# Altium integrated library LIB1.IntLib: 106 symbols (part 2 of 3)
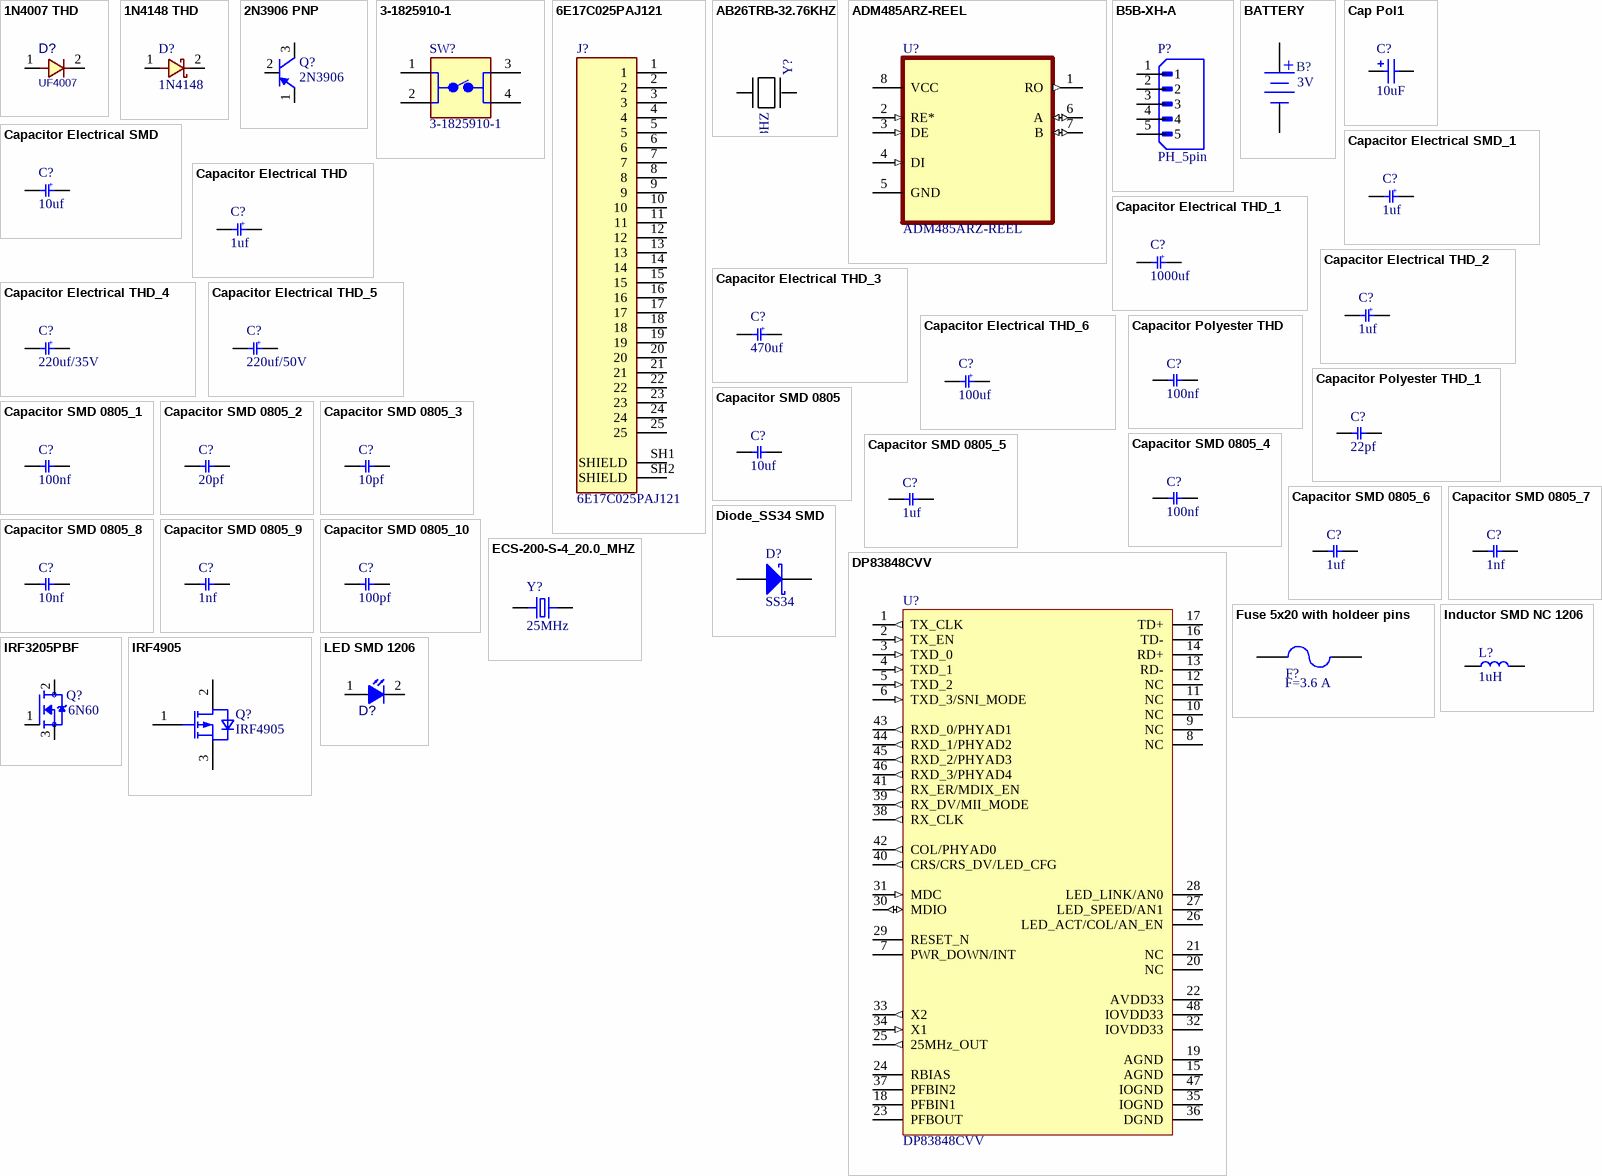
[diagram p3: symbols 1N4007 THD to LED SMD 1206]

## LED SMD 1206
designator D?  (value not drawn)
ComponentLink1Description: Tarahiboard; ComponentLink1URL: https://www.tarahiboard.com/product/library-pack; DatasheetVersion: 2022
footprint LED SMD 1206 (Blue) ((Make www.tarahiboard.com))
footprint LED SMD 1206 (Green) ((Make www.tarahiboard.com))
footprint LED SMD 1206 (Red) ((Make www.tarahiboard.com))
footprint LED SMD 1206 (White) ((Make www.tarahiboard.com))
footprint LED SMD 1206 (Yellow) ((Make www.tarahiboard.com))
footprint LED SMD 1206 2 (Red) ((Make www.tarahiboard.com))
pins: 1 ANODE, 2 CATHODE

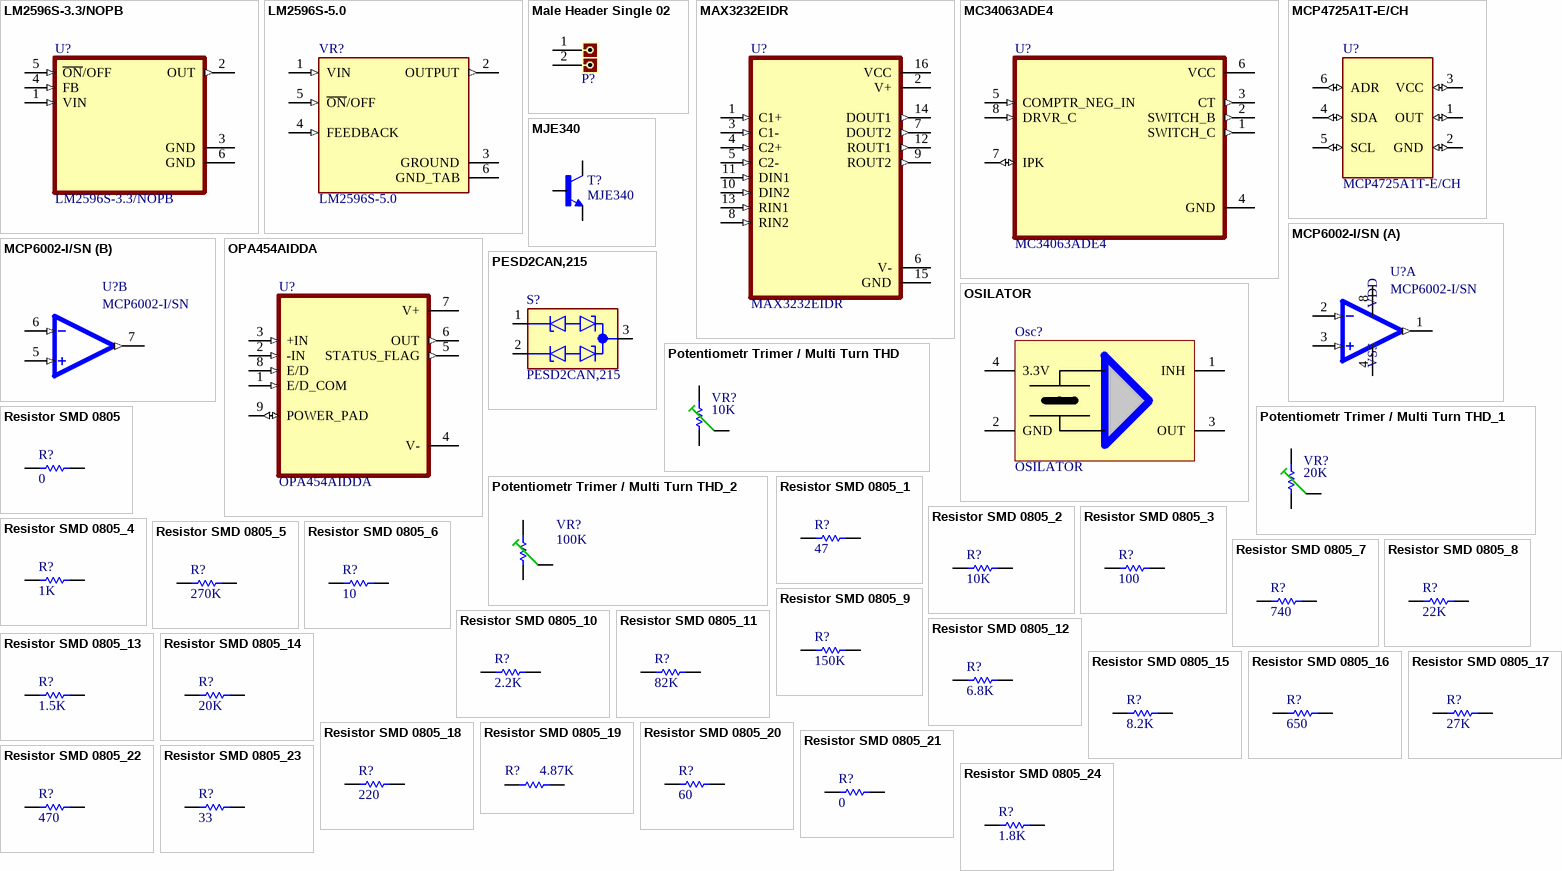
[diagram p1: symbols LM2596S-3.3/NOPB to Resistor SMD 0805_24]

## LM2596S-3.3/NOPB
designator U?
SIMPLE SWITCHERÂ® 4.5V to 40V, 3A Low Component Count Step-Down Regulator 5-DDPAK/TO-263; MF: Texas Instruments; SnapEDA_Link: https://www.snapeda.com/parts/LM2596S-3.3/Texas+Instruments/view-part/?ref=snap; Package: TO-263-5 Texas Instruments; Value: *; MP: LM2596S-3.3; Check_prices: https://www.snapeda.com/parts/LM2596S-3.3/Texas+Instruments/view-part/?ref=eda
footprint VREG_LM2596S-3.3/NOPB
pins: 1 VIN (in), 2 OUT (out), 3 GND (power), 4 FB (in), 5 ~{ON}/OFF (in), 6 GND (power)

## LM2596S-5.0
designator VR?
SIMPLE SWITCHERÂ® 4.5V to 40V, 3A Low Component Count Step-Down Regulator; MF: Texas Instruments; MP: LM2596S-5.0/NOPB; SnapEDA_Link: https://www.snapeda.com/parts/LM2596S-5.0/NOPB/Texas+Instruments/view-part/?ref=snap; Package: TO-263-5 Texas Instruments; Value: *; Check_prices: https://www.snapeda.com/parts/LM2596S-5.0/NOPB/Texas+Instruments/view-part/?ref=eda
footprint TO170P1524X483-6N
pins: 1 VIN (in), 2 OUTPUT (out), 3 GROUND (power), 4 FEEDBACK (in), 5 ~{ON}/OFF (in), 6 GND_TAB (power)

## Male Header Single 02
designator P?  (value not drawn)
Male, pitch: 2.54mm; ComponentLink1Description: Tarahiboard; ComponentLink1URL: https://www.tarahiboard.com/product/library-pack; DatasheetVersion: 2022
footprint MHDR1X02-254P (Male Header 1X02 with 2.54 mm Pitch (Make www.tarahiboard.com))
footprint HDR 1X2 (Connector; Header; 2 Position (Make www.tarahiboard.com))
pins: 1, 2
1 alternate drawing of the same symbol

## MAX3232EIDR
designator U?
3- to 5.5-V dual channel 250kbps RS-232 line driver/receiver with +/-15-kV IEC-ESD protection; MF: Texas Instruments; SnapEDA_Link: https://www.snapeda.com/parts/MAX3232EIDR/Texas+Instruments/view-part/?ref=snap; Package: SOIC-16 Texas Instruments; Value: *; MP: MAX3232EIDR; Check_prices: https://www.snapeda.com/parts/MAX3232EIDR/Texas+Instruments/view-part/?ref=eda
footprint SOIC127P600X175-16N
pins: 1 C1+ (in), 2 V+ (power), 3 C1- (in), 4 C2+ (in), 5 C2- (in), 6 V- (power), 7 DOUT2 (out), 8 RIN2 (in), 9 ROUT2 (out), 10 DIN2 (in), 11 DIN1 (in), 12 ROUT1 (out), 13 RIN1 (in), 14 DOUT1 (out), 15 GND (power), 16 VCC (power)

## MC34063ADE4
designator U?
1.5-A Boost/Buck/Inverting Switching Regulator 8-SOIC 0 to 70; MF: Texas Instruments; SnapEDA_Link: https://www.snapeda.com/parts/MC34063ADE4/Texas+Instruments/view-part/?ref=snap; Package: SOIC-8 Texas Instruments; Value: *; MP: MC34063ADE4; Check_prices: https://www.snapeda.com/parts/MC34063ADE4/Texas+Instruments/view-part/?ref=eda
footprint SOIC127P599X175-8N
pins: 1 SWITCH_C (out), 2 SWITCH_B (out), 3 CT (out), 4 GND (power), 5 COMPTR_NEG_IN (in), 6 VCC (power), 7 IPK (io), 8 DRVR_C (in)

## MCP4725A1T-E/CH
designator U?
Single, 12-bit NV DAC w/ I2C interface6SOT-23 T/R | Microchip Technology Inc. MCP4725A1T-E/CH; SnapEDA_Link: https://www.snapeda.com/parts/MCP4725A1T-E/CH/Microchip/view-part/?ref=snap; Package: SOT-23-6 Microchip; Value: *; MF: Microchip; MP: MCP4725A1T-E/CH; Check_prices: https://www.snapeda.com/parts/MCP4725A1T-E/CH/Microchip/view-part/?ref=eda
footprint SOT23-6
pins: 1 OUT (io), 2 GND (io), 3 VCC (io), 4 SDA (io), 5 SCL (io), 6 ADR (io)

## MCP6002-I/SN
designator U?
Microchip , Dual Op Amp, 1MHzCMOS, Rail to Rail, 3V, 5V, 8-Pin SOIC | Microchip Technology Inc. MCP6002-I/SN; SnapEDA_Link: https://www.snapeda.com/parts/MCP6002-I/SN/Microchip/view-part/?ref=snap; Package: SO-8 Microchip; Value: *; MF: Microchip; MP: MCP6002-I/SN; Check_prices: https://www.snapeda.com/parts/MCP6002-I/SN/Microchip/view-part/?ref=eda
footprint SOIC127P600X175-8N
part A pins: 1 VOUTA (out), 2 VINA- (in), 3 VINA+ (in), 4 VSS (power), 8 VDD (power)
part B pins: 5 VINB+ (in), 6 VINB- (in), 7 VOUTB (out)

## MJE340
designator T?
Transistor lÆ°á»¡ng cá»±c (BJT) NPN 300 V 500 mA - 20,8 W XuyÃªn lá»— SOT-32-3; MF: STMicroelectronics; SnapEDA_Link: https://www.snapeda.com/parts/MJE340/STMicroelectronics/view-part/?ref=snap; Package: TO-126-3 Motorola; Value: *; MP: MJE340; Check_prices: https://www.snapeda.com/parts/MJE340/STMicroelectronics/view-part/?ref=eda
footprint TO126
pins: 1 E, 2 C, 3 B

## OPA454AIDDA
designator U?
High voltage (100 V), high-current (50 mA) operational amplifiers, g=1 stable; MF: Texas Instruments; SnapEDA_Link: https://www.snapeda.com/parts/OPA454AIDDA/Texas+Instruments/view-part/?ref=snap; Package: HSOIC-8 Texas Instruments; Value: *; MP: OPA454AIDDA; Check_prices: https://www.snapeda.com/parts/OPA454AIDDA/Texas+Instruments/view-part/?ref=eda
footprint VREG_LM5017MR/NOPB
pins: 1 E/D_COM (in), 2 -IN (in), 3 +IN (in), 4 V- (power), 5 STATUS_FLAG (out), 6 OUT (out), 7 V+ (power), 8 E/D (in), 9 POWER_PAD (io)

## OSILATOR
designator Osc?
footprint XTAL_5X7
pins: 1 INH, 2 GND, 3 OUT, 4 3.3V

## PESD2CAN,215
designator S?
41V í´ëž¨í”„ 5A(8/20Î¼s) Ipp TVS ë‹¤ì´ì˜¤ë“œ í‘œë©´ ì‹¤ìž¥ TO-236AB; MF: Nexperia USA Inc.; SnapEDA_Link: https://www.snapeda.com/parts/PESD2CAN,215/Nexperia/view-part/?ref=snap; Package: TO-236-3 Nexperia USA Inc.; Value: *; MP: PESD2CAN,215; Check_prices: https://www.snapeda.com/parts/PESD2CAN,215/Nexperia/view-part/?ref=eda
footprint DIO_PESD2CAN,215
pins: 1 C1, 2 C2, 3 CC

## Potentiometr Trimer / Multi Turn THD
designator VR?  value 10K  (hidden comment: Potentiometr Trimer / Multi Turn THD)
DatasheetVersion: 2022; ComponentLink1Description: Tarahiboard; ComponentLink1URL: https://www.tarahiboard.com/product/library-pack
footprint POT_V10MM (POT, TRIM, V-10 10mm (Make www.tarahiboard.com))
footprint POT_PIHER15MM (POT, TRIM, PIHER PT-15 15mm (Make www.tarahiboard.com))
footprint POT_PIHER10MM (POT, TRIM, PIHER PT-10 10mm (Make www.tarahiboard.com))
footprint POT_CA9MTV (POT, TRIM, 10.0X10.0mm, CA9MTV (Make www.tarahiboard.com))
footprint POT_3362S (POT, TRIM, 4.3X6.6mm 3362S (Make www.tarahiboard.com))
footprint POT_3362H (POT, TRIM, 6.6X6.8mm 3362H, 3362P, 3362R (Make www.tarahiboard.com))
footprint S64Y
footprint S64W
footprint POT_3306W (POT, TRIM, 4.5X6.8mm 3306W (Make www.tarahiboard.com))
footprint POT_3306F (POT, TRIM, 7.0X7.0mm, pitch: 2.5mm, MURATA, 3306F (Make www.tarahiboard.com))
footprint POT_3296Z (POT, TRIM, 10.0X5.0mm, pitch: 2.5mm, 3296Z (Make www.tarahiboard.com))
footprint POT_3296Y (POT, TRIM, 10.0X5.0mm, pitch: 2.5mm, MURATA, PV36Y 3296Y S64Y (Make www.tarahiboard.com))
footprint POT_3296X (POT, TRIM, 10.0X5.0mm, pitch: 2.5mm, MURATA, PV36X 3296X (Make www.tarahiboard.com))
footprint POT_3296W (POT, TRIM, 10.0X5.0mm, pitch: 2.5mm 3299W 3296W S64W (Make www.tarahiboard.com))
footprint POT_3296P (POT, TRIM, 9.5X9.5mm HORIZENTAL 3296P (Make www.tarahiboard.com))
footprint POT_3262W (POT, TRIM, 4.3X6.6mm 3262W (Make www.tarahiboard.com))
footprint POT_3260H (POT, TRIM, 4.3X6.3mm 3260H (Make www.tarahiboard.com))
footprint POT_3006P (POT, TRIM, 19.0X4.8mm 3006P (Make www.tarahiboard.com))
footprint POT_7X5 (POT, TRIM, 7.5X5.0mm, pitch: 5.0mm (Make www.tarahiboard.com))
footprint Pot 00 ((Make www.tarahiboard.com))
footprint Multi Turn 02 ((Make www.tarahiboard.com))
footprint Multi Turn 01 (Stand Multi Turn - Turning CW Increase P1~2 Resistor (Make www.tarahiboard.com))
footprint CA9V ((Make www.tarahiboard.com))
footprint CA9MTV ((Make www.tarahiboard.com))
footprint CA9H5 ((Make www.tarahiboard.com))
footprint 3306W ((Make www.tarahiboard.com))
footprint 3306F ((Make www.tarahiboard.com))
footprint 3296Z ((Make www.tarahiboard.com))
footprint 3296Y ((Make www.tarahiboard.com))
footprint 3296X
footprint 3296W
footprint 3296P
footprint 3006P
pins: 1, 2, 3

## Potentiometr Trimer / Multi Turn THD_1
designator VR?, comment value 20K  (hidden comment: Potentiometr Trimer / Multi Turn THD)
DatasheetVersion: 2022; ComponentLink1Description: Tarahiboard; ComponentLink1URL: https://www.tarahiboard.com/product/library-pack
footprint POT_V10MM (POT, TRIM, V-10 10mm (Make www.tarahiboard.com))
footprint POT_PIHER15MM (POT, TRIM, PIHER PT-15 15mm (Make www.tarahiboard.com))
footprint POT_PIHER10MM (POT, TRIM, PIHER PT-10 10mm (Make www.tarahiboard.com))
footprint POT_CA9MTV (POT, TRIM, 10.0X10.0mm, CA9MTV (Make www.tarahiboard.com))
footprint POT_3362S (POT, TRIM, 4.3X6.6mm 3362S (Make www.tarahiboard.com))
footprint POT_3362H (POT, TRIM, 6.6X6.8mm 3362H, 3362P, 3362R (Make www.tarahiboard.com))
footprint S64Y
footprint S64W
footprint POT_3306W (POT, TRIM, 4.5X6.8mm 3306W (Make www.tarahiboard.com))
footprint POT_3306F (POT, TRIM, 7.0X7.0mm, pitch: 2.5mm, MURATA, 3306F (Make www.tarahiboard.com))
footprint POT_3296Z (POT, TRIM, 10.0X5.0mm, pitch: 2.5mm, 3296Z (Make www.tarahiboard.com))
footprint POT_3296Y (POT, TRIM, 10.0X5.0mm, pitch: 2.5mm, MURATA, PV36Y 3296Y S64Y (Make www.tarahiboard.com))
footprint POT_3296X (POT, TRIM, 10.0X5.0mm, pitch: 2.5mm, MURATA, PV36X 3296X (Make www.tarahiboard.com))
footprint POT_3296W (POT, TRIM, 10.0X5.0mm, pitch: 2.5mm 3299W 3296W S64W (Make www.tarahiboard.com))
footprint POT_3296P (POT, TRIM, 9.5X9.5mm HORIZENTAL 3296P (Make www.tarahiboard.com))
footprint POT_3262W (POT, TRIM, 4.3X6.6mm 3262W (Make www.tarahiboard.com))
footprint POT_3260H (POT, TRIM, 4.3X6.3mm 3260H (Make www.tarahiboard.com))
footprint POT_3006P (POT, TRIM, 19.0X4.8mm 3006P (Make www.tarahiboard.com))
footprint POT_7X5 (POT, TRIM, 7.5X5.0mm, pitch: 5.0mm (Make www.tarahiboard.com))
footprint Pot 00 ((Make www.tarahiboard.com))
footprint Multi Turn 02 ((Make www.tarahiboard.com))
footprint Multi Turn 01 (Stand Multi Turn - Turning CW Increase P1~2 Resistor (Make www.tarahiboard.com))
footprint CA9V ((Make www.tarahiboard.com))
footprint CA9MTV ((Make www.tarahiboard.com))
footprint CA9H5 ((Make www.tarahiboard.com))
footprint 3306W ((Make www.tarahiboard.com))
footprint 3306F ((Make www.tarahiboard.com))
footprint 3296Z ((Make www.tarahiboard.com))
footprint 3296Y ((Make www.tarahiboard.com))
footprint 3296X
footprint 3296W
footprint 3296P
footprint 3006P
pins: 1, 2, 3

## Potentiometr Trimer / Multi Turn THD_2
designator VR?, comment value 100K  (hidden comment: Potentiometr Trimer / Multi Turn THD)
DatasheetVersion: 2022; ComponentLink1Description: Tarahiboard; ComponentLink1URL: https://www.tarahiboard.com/product/library-pack
footprint POT_V10MM (POT, TRIM, V-10 10mm (Make www.tarahiboard.com))
footprint POT_PIHER15MM (POT, TRIM, PIHER PT-15 15mm (Make www.tarahiboard.com))
footprint POT_PIHER10MM (POT, TRIM, PIHER PT-10 10mm (Make www.tarahiboard.com))
footprint POT_CA9MTV (POT, TRIM, 10.0X10.0mm, CA9MTV (Make www.tarahiboard.com))
footprint POT_3362S (POT, TRIM, 4.3X6.6mm 3362S (Make www.tarahiboard.com))
footprint POT_3362H (POT, TRIM, 6.6X6.8mm 3362H, 3362P, 3362R (Make www.tarahiboard.com))
footprint S64Y
footprint S64W
footprint POT_3306W (POT, TRIM, 4.5X6.8mm 3306W (Make www.tarahiboard.com))
footprint POT_3306F (POT, TRIM, 7.0X7.0mm, pitch: 2.5mm, MURATA, 3306F (Make www.tarahiboard.com))
footprint POT_3296Z (POT, TRIM, 10.0X5.0mm, pitch: 2.5mm, 3296Z (Make www.tarahiboard.com))
footprint POT_3296Y (POT, TRIM, 10.0X5.0mm, pitch: 2.5mm, MURATA, PV36Y 3296Y S64Y (Make www.tarahiboard.com))
footprint POT_3296X (POT, TRIM, 10.0X5.0mm, pitch: 2.5mm, MURATA, PV36X 3296X (Make www.tarahiboard.com))
footprint POT_3296W (POT, TRIM, 10.0X5.0mm, pitch: 2.5mm 3299W 3296W S64W (Make www.tarahiboard.com))
footprint POT_3296P (POT, TRIM, 9.5X9.5mm HORIZENTAL 3296P (Make www.tarahiboard.com))
footprint POT_3262W (POT, TRIM, 4.3X6.6mm 3262W (Make www.tarahiboard.com))
footprint POT_3260H (POT, TRIM, 4.3X6.3mm 3260H (Make www.tarahiboard.com))
footprint POT_3006P (POT, TRIM, 19.0X4.8mm 3006P (Make www.tarahiboard.com))
footprint POT_7X5 (POT, TRIM, 7.5X5.0mm, pitch: 5.0mm (Make www.tarahiboard.com))
footprint Pot 00 ((Make www.tarahiboard.com))
footprint Multi Turn 02 ((Make www.tarahiboard.com))
footprint Multi Turn 01 (Stand Multi Turn - Turning CW Increase P1~2 Resistor (Make www.tarahiboard.com))
footprint CA9V ((Make www.tarahiboard.com))
footprint CA9MTV ((Make www.tarahiboard.com))
footprint CA9H5 ((Make www.tarahiboard.com))
footprint 3306W ((Make www.tarahiboard.com))
footprint 3306F ((Make www.tarahiboard.com))
footprint 3296Z ((Make www.tarahiboard.com))
footprint 3296Y ((Make www.tarahiboard.com))
footprint 3296X
footprint 3296W
footprint 3296P
footprint 3006P
pins: 1, 2, 3

## Resistor SMD 0805
designator R?  value 0  (hidden comment: Resistor SMD 0805)
DatasheetVersion: 2022; ComponentLink1Description: Website: Tarahiboard; ComponentLink1URL: https://www.tarahiboard.com/product/library-pack
footprint SMD-0805-RES ((Make www.tarahiboard.com))
footprint RESC2012L (0805) (Chip Resistor, Body 2.0x1.3mm, IPC High Density (Make www.tarahiboard.com))
footprint RESC2012M (0805) (Chip Resistor, Body 2.0x1.3mm, IPC Low Density (Make www.tarahiboard.com))
footprint RESC2012N (0805) (Chip Resistor, Body 2.0x1.3mm, IPC Medium Density (Make www.tarahiboard.com))
footprint RES 0805 (2012X06L) (Chip Resistor, 2-Leads, Body 2.0x1.3mm, IPC High Density _ (0.100 W) (Make www.tarahiboard.com))
footprint R0805 (CHIP RESISTOR 1/8 WATT ,2.0X1.3mm, 0805, 2012 (Make www.tarahiboard.com))
footprint R0805E (CHIP RESISTOR 1/8 WATT ,2.0X1.3mm, 0805, EXPANDED PAD (Make www.tarahiboard.com))
pins: 1, 2

## Resistor SMD 0805_1
designator R?, comment value 47  (hidden comment: Resistor SMD 0805)
DatasheetVersion: 2022; ComponentLink1Description: Website: Tarahiboard; ComponentLink1URL: https://www.tarahiboard.com/product/library-pack
footprint SMD-0805-RES ((Make www.tarahiboard.com))
footprint RESC2012L (0805) (Chip Resistor, Body 2.0x1.3mm, IPC High Density (Make www.tarahiboard.com))
footprint RESC2012M (0805) (Chip Resistor, Body 2.0x1.3mm, IPC Low Density (Make www.tarahiboard.com))
footprint RESC2012N (0805) (Chip Resistor, Body 2.0x1.3mm, IPC Medium Density (Make www.tarahiboard.com))
footprint RES 0805 (2012X06L) (Chip Resistor, 2-Leads, Body 2.0x1.3mm, IPC High Density _ (0.100 W) (Make www.tarahiboard.com))
footprint R0805 (CHIP RESISTOR 1/8 WATT ,2.0X1.3mm, 0805, 2012 (Make www.tarahiboard.com))
footprint R0805E (CHIP RESISTOR 1/8 WATT ,2.0X1.3mm, 0805, EXPANDED PAD (Make www.tarahiboard.com))
pins: 1, 2

## Resistor SMD 0805_2
designator R?, comment value 10K  (hidden comment: Resistor SMD 0805)
DatasheetVersion: 2022; ComponentLink1Description: Website: Tarahiboard; ComponentLink1URL: https://www.tarahiboard.com/product/library-pack
footprint SMD-0805-RES ((Make www.tarahiboard.com))
footprint RESC2012L (0805) (Chip Resistor, Body 2.0x1.3mm, IPC High Density (Make www.tarahiboard.com))
footprint RESC2012M (0805) (Chip Resistor, Body 2.0x1.3mm, IPC Low Density (Make www.tarahiboard.com))
footprint RESC2012N (0805) (Chip Resistor, Body 2.0x1.3mm, IPC Medium Density (Make www.tarahiboard.com))
footprint RES 0805 (2012X06L) (Chip Resistor, 2-Leads, Body 2.0x1.3mm, IPC High Density _ (0.100 W) (Make www.tarahiboard.com))
footprint R0805 (CHIP RESISTOR 1/8 WATT ,2.0X1.3mm, 0805, 2012 (Make www.tarahiboard.com))
footprint R0805E (CHIP RESISTOR 1/8 WATT ,2.0X1.3mm, 0805, EXPANDED PAD (Make www.tarahiboard.com))
pins: 1, 2

## Resistor SMD 0805_3
designator R?, comment value 100  (hidden comment: Resistor SMD 0805)
DatasheetVersion: 2022; ComponentLink1Description: Website: Tarahiboard; ComponentLink1URL: https://www.tarahiboard.com/product/library-pack
footprint SMD-0805-RES ((Make www.tarahiboard.com))
footprint RESC2012L (0805) (Chip Resistor, Body 2.0x1.3mm, IPC High Density (Make www.tarahiboard.com))
footprint RESC2012M (0805) (Chip Resistor, Body 2.0x1.3mm, IPC Low Density (Make www.tarahiboard.com))
footprint RESC2012N (0805) (Chip Resistor, Body 2.0x1.3mm, IPC Medium Density (Make www.tarahiboard.com))
footprint RES 0805 (2012X06L) (Chip Resistor, 2-Leads, Body 2.0x1.3mm, IPC High Density _ (0.100 W) (Make www.tarahiboard.com))
footprint R0805 (CHIP RESISTOR 1/8 WATT ,2.0X1.3mm, 0805, 2012 (Make www.tarahiboard.com))
footprint R0805E (CHIP RESISTOR 1/8 WATT ,2.0X1.3mm, 0805, EXPANDED PAD (Make www.tarahiboard.com))
pins: 1, 2

## Resistor SMD 0805_4
designator R?, comment value 1K  (hidden comment: Resistor SMD 0805)
DatasheetVersion: 2022; ComponentLink1Description: Website: Tarahiboard; ComponentLink1URL: https://www.tarahiboard.com/product/library-pack
footprint SMD-0805-RES ((Make www.tarahiboard.com))
footprint RESC2012L (0805) (Chip Resistor, Body 2.0x1.3mm, IPC High Density (Make www.tarahiboard.com))
footprint RESC2012M (0805) (Chip Resistor, Body 2.0x1.3mm, IPC Low Density (Make www.tarahiboard.com))
footprint RESC2012N (0805) (Chip Resistor, Body 2.0x1.3mm, IPC Medium Density (Make www.tarahiboard.com))
footprint RES 0805 (2012X06L) (Chip Resistor, 2-Leads, Body 2.0x1.3mm, IPC High Density _ (0.100 W) (Make www.tarahiboard.com))
footprint R0805 (CHIP RESISTOR 1/8 WATT ,2.0X1.3mm, 0805, 2012 (Make www.tarahiboard.com))
footprint R0805E (CHIP RESISTOR 1/8 WATT ,2.0X1.3mm, 0805, EXPANDED PAD (Make www.tarahiboard.com))
pins: 1, 2

## Resistor SMD 0805_5
designator R?, comment value 270K  (hidden comment: Resistor SMD 0805)
DatasheetVersion: 2022; ComponentLink1Description: Website: Tarahiboard; ComponentLink1URL: https://www.tarahiboard.com/product/library-pack
footprint SMD-0805-RES ((Make www.tarahiboard.com))
footprint RESC2012L (0805) (Chip Resistor, Body 2.0x1.3mm, IPC High Density (Make www.tarahiboard.com))
footprint RESC2012M (0805) (Chip Resistor, Body 2.0x1.3mm, IPC Low Density (Make www.tarahiboard.com))
footprint RESC2012N (0805) (Chip Resistor, Body 2.0x1.3mm, IPC Medium Density (Make www.tarahiboard.com))
footprint RES 0805 (2012X06L) (Chip Resistor, 2-Leads, Body 2.0x1.3mm, IPC High Density _ (0.100 W) (Make www.tarahiboard.com))
footprint R0805 (CHIP RESISTOR 1/8 WATT ,2.0X1.3mm, 0805, 2012 (Make www.tarahiboard.com))
footprint R0805E (CHIP RESISTOR 1/8 WATT ,2.0X1.3mm, 0805, EXPANDED PAD (Make www.tarahiboard.com))
pins: 1, 2

## Resistor SMD 0805_6
designator R?, comment value 10  (hidden comment: Resistor SMD 0805)
DatasheetVersion: 2022; ComponentLink1Description: Website: Tarahiboard; ComponentLink1URL: https://www.tarahiboard.com/product/library-pack
footprint SMD-0805-RES ((Make www.tarahiboard.com))
footprint RESC2012L (0805) (Chip Resistor, Body 2.0x1.3mm, IPC High Density (Make www.tarahiboard.com))
footprint RESC2012M (0805) (Chip Resistor, Body 2.0x1.3mm, IPC Low Density (Make www.tarahiboard.com))
footprint RESC2012N (0805) (Chip Resistor, Body 2.0x1.3mm, IPC Medium Density (Make www.tarahiboard.com))
footprint RES 0805 (2012X06L) (Chip Resistor, 2-Leads, Body 2.0x1.3mm, IPC High Density _ (0.100 W) (Make www.tarahiboard.com))
footprint R0805 (CHIP RESISTOR 1/8 WATT ,2.0X1.3mm, 0805, 2012 (Make www.tarahiboard.com))
footprint R0805E (CHIP RESISTOR 1/8 WATT ,2.0X1.3mm, 0805, EXPANDED PAD (Make www.tarahiboard.com))
pins: 1, 2

## Resistor SMD 0805_7
designator R?, comment value 740  (hidden comment: Resistor SMD 0805)
DatasheetVersion: 2022; ComponentLink1Description: Website: Tarahiboard; ComponentLink1URL: https://www.tarahiboard.com/product/library-pack
footprint SMD-0805-RES ((Make www.tarahiboard.com))
footprint RESC2012L (0805) (Chip Resistor, Body 2.0x1.3mm, IPC High Density (Make www.tarahiboard.com))
footprint RESC2012M (0805) (Chip Resistor, Body 2.0x1.3mm, IPC Low Density (Make www.tarahiboard.com))
footprint RESC2012N (0805) (Chip Resistor, Body 2.0x1.3mm, IPC Medium Density (Make www.tarahiboard.com))
footprint RES 0805 (2012X06L) (Chip Resistor, 2-Leads, Body 2.0x1.3mm, IPC High Density _ (0.100 W) (Make www.tarahiboard.com))
footprint R0805 (CHIP RESISTOR 1/8 WATT ,2.0X1.3mm, 0805, 2012 (Make www.tarahiboard.com))
footprint R0805E (CHIP RESISTOR 1/8 WATT ,2.0X1.3mm, 0805, EXPANDED PAD (Make www.tarahiboard.com))
pins: 1, 2

## Resistor SMD 0805_8
designator R?, comment value 22K  (hidden comment: Resistor SMD 0805)
DatasheetVersion: 2022; ComponentLink1Description: Website: Tarahiboard; ComponentLink1URL: https://www.tarahiboard.com/product/library-pack
footprint SMD-0805-RES ((Make www.tarahiboard.com))
footprint RESC2012L (0805) (Chip Resistor, Body 2.0x1.3mm, IPC High Density (Make www.tarahiboard.com))
footprint RESC2012M (0805) (Chip Resistor, Body 2.0x1.3mm, IPC Low Density (Make www.tarahiboard.com))
footprint RESC2012N (0805) (Chip Resistor, Body 2.0x1.3mm, IPC Medium Density (Make www.tarahiboard.com))
footprint RES 0805 (2012X06L) (Chip Resistor, 2-Leads, Body 2.0x1.3mm, IPC High Density _ (0.100 W) (Make www.tarahiboard.com))
footprint R0805 (CHIP RESISTOR 1/8 WATT ,2.0X1.3mm, 0805, 2012 (Make www.tarahiboard.com))
footprint R0805E (CHIP RESISTOR 1/8 WATT ,2.0X1.3mm, 0805, EXPANDED PAD (Make www.tarahiboard.com))
pins: 1, 2

## Resistor SMD 0805_9
designator R?, comment value 150K  (hidden comment: Resistor SMD 0805)
DatasheetVersion: 2022; ComponentLink1Description: Website: Tarahiboard; ComponentLink1URL: https://www.tarahiboard.com/product/library-pack
footprint SMD-0805-RES ((Make www.tarahiboard.com))
footprint RESC2012L (0805) (Chip Resistor, Body 2.0x1.3mm, IPC High Density (Make www.tarahiboard.com))
footprint RESC2012M (0805) (Chip Resistor, Body 2.0x1.3mm, IPC Low Density (Make www.tarahiboard.com))
footprint RESC2012N (0805) (Chip Resistor, Body 2.0x1.3mm, IPC Medium Density (Make www.tarahiboard.com))
footprint RES 0805 (2012X06L) (Chip Resistor, 2-Leads, Body 2.0x1.3mm, IPC High Density _ (0.100 W) (Make www.tarahiboard.com))
footprint R0805 (CHIP RESISTOR 1/8 WATT ,2.0X1.3mm, 0805, 2012 (Make www.tarahiboard.com))
footprint R0805E (CHIP RESISTOR 1/8 WATT ,2.0X1.3mm, 0805, EXPANDED PAD (Make www.tarahiboard.com))
pins: 1, 2

## Resistor SMD 0805_10
designator R?, comment value 2.2K  (hidden comment: Resistor SMD 0805)
DatasheetVersion: 2022; ComponentLink1Description: Website: Tarahiboard; ComponentLink1URL: https://www.tarahiboard.com/product/library-pack
footprint SMD-0805-RES ((Make www.tarahiboard.com))
footprint RESC2012L (0805) (Chip Resistor, Body 2.0x1.3mm, IPC High Density (Make www.tarahiboard.com))
footprint RESC2012M (0805) (Chip Resistor, Body 2.0x1.3mm, IPC Low Density (Make www.tarahiboard.com))
footprint RESC2012N (0805) (Chip Resistor, Body 2.0x1.3mm, IPC Medium Density (Make www.tarahiboard.com))
footprint RES 0805 (2012X06L) (Chip Resistor, 2-Leads, Body 2.0x1.3mm, IPC High Density _ (0.100 W) (Make www.tarahiboard.com))
footprint R0805 (CHIP RESISTOR 1/8 WATT ,2.0X1.3mm, 0805, 2012 (Make www.tarahiboard.com))
footprint R0805E (CHIP RESISTOR 1/8 WATT ,2.0X1.3mm, 0805, EXPANDED PAD (Make www.tarahiboard.com))
pins: 1, 2

## Resistor SMD 0805_11
designator R?, comment value 82K  (hidden comment: Resistor SMD 0805)
DatasheetVersion: 2022; ComponentLink1Description: Website: Tarahiboard; ComponentLink1URL: https://www.tarahiboard.com/product/library-pack
footprint SMD-0805-RES ((Make www.tarahiboard.com))
footprint RESC2012L (0805) (Chip Resistor, Body 2.0x1.3mm, IPC High Density (Make www.tarahiboard.com))
footprint RESC2012M (0805) (Chip Resistor, Body 2.0x1.3mm, IPC Low Density (Make www.tarahiboard.com))
footprint RESC2012N (0805) (Chip Resistor, Body 2.0x1.3mm, IPC Medium Density (Make www.tarahiboard.com))
footprint RES 0805 (2012X06L) (Chip Resistor, 2-Leads, Body 2.0x1.3mm, IPC High Density _ (0.100 W) (Make www.tarahiboard.com))
footprint R0805 (CHIP RESISTOR 1/8 WATT ,2.0X1.3mm, 0805, 2012 (Make www.tarahiboard.com))
footprint R0805E (CHIP RESISTOR 1/8 WATT ,2.0X1.3mm, 0805, EXPANDED PAD (Make www.tarahiboard.com))
pins: 1, 2

## Resistor SMD 0805_12
designator R?, comment value 6.8K  (hidden comment: Resistor SMD 0805)
DatasheetVersion: 2022; ComponentLink1Description: Website: Tarahiboard; ComponentLink1URL: https://www.tarahiboard.com/product/library-pack
footprint SMD-0805-RES ((Make www.tarahiboard.com))
footprint RESC2012L (0805) (Chip Resistor, Body 2.0x1.3mm, IPC High Density (Make www.tarahiboard.com))
footprint RESC2012M (0805) (Chip Resistor, Body 2.0x1.3mm, IPC Low Density (Make www.tarahiboard.com))
footprint RESC2012N (0805) (Chip Resistor, Body 2.0x1.3mm, IPC Medium Density (Make www.tarahiboard.com))
footprint RES 0805 (2012X06L) (Chip Resistor, 2-Leads, Body 2.0x1.3mm, IPC High Density _ (0.100 W) (Make www.tarahiboard.com))
footprint R0805 (CHIP RESISTOR 1/8 WATT ,2.0X1.3mm, 0805, 2012 (Make www.tarahiboard.com))
footprint R0805E (CHIP RESISTOR 1/8 WATT ,2.0X1.3mm, 0805, EXPANDED PAD (Make www.tarahiboard.com))
pins: 1, 2

## Resistor SMD 0805_13
designator R?, comment value 1.5K  (hidden comment: Resistor SMD 0805)
DatasheetVersion: 2022; ComponentLink1Description: Website: Tarahiboard; ComponentLink1URL: https://www.tarahiboard.com/product/library-pack
footprint SMD-0805-RES ((Make www.tarahiboard.com))
footprint RESC2012L (0805) (Chip Resistor, Body 2.0x1.3mm, IPC High Density (Make www.tarahiboard.com))
footprint RESC2012M (0805) (Chip Resistor, Body 2.0x1.3mm, IPC Low Density (Make www.tarahiboard.com))
footprint RESC2012N (0805) (Chip Resistor, Body 2.0x1.3mm, IPC Medium Density (Make www.tarahiboard.com))
footprint RES 0805 (2012X06L) (Chip Resistor, 2-Leads, Body 2.0x1.3mm, IPC High Density _ (0.100 W) (Make www.tarahiboard.com))
footprint R0805 (CHIP RESISTOR 1/8 WATT ,2.0X1.3mm, 0805, 2012 (Make www.tarahiboard.com))
footprint R0805E (CHIP RESISTOR 1/8 WATT ,2.0X1.3mm, 0805, EXPANDED PAD (Make www.tarahiboard.com))
pins: 1, 2

## Resistor SMD 0805_14
designator R?, comment value 20K  (hidden comment: Resistor SMD 0805)
DatasheetVersion: 2022; ComponentLink1Description: Website: Tarahiboard; ComponentLink1URL: https://www.tarahiboard.com/product/library-pack
footprint SMD-0805-RES ((Make www.tarahiboard.com))
footprint RESC2012L (0805) (Chip Resistor, Body 2.0x1.3mm, IPC High Density (Make www.tarahiboard.com))
footprint RESC2012M (0805) (Chip Resistor, Body 2.0x1.3mm, IPC Low Density (Make www.tarahiboard.com))
footprint RESC2012N (0805) (Chip Resistor, Body 2.0x1.3mm, IPC Medium Density (Make www.tarahiboard.com))
footprint RES 0805 (2012X06L) (Chip Resistor, 2-Leads, Body 2.0x1.3mm, IPC High Density _ (0.100 W) (Make www.tarahiboard.com))
footprint R0805 (CHIP RESISTOR 1/8 WATT ,2.0X1.3mm, 0805, 2012 (Make www.tarahiboard.com))
footprint R0805E (CHIP RESISTOR 1/8 WATT ,2.0X1.3mm, 0805, EXPANDED PAD (Make www.tarahiboard.com))
pins: 1, 2

## Resistor SMD 0805_15
designator R?, comment value 8.2K  (hidden comment: Resistor SMD 0805)
DatasheetVersion: 2022; ComponentLink1Description: Website: Tarahiboard; ComponentLink1URL: https://www.tarahiboard.com/product/library-pack
footprint SMD-0805-RES ((Make www.tarahiboard.com))
footprint RESC2012L (0805) (Chip Resistor, Body 2.0x1.3mm, IPC High Density (Make www.tarahiboard.com))
footprint RESC2012M (0805) (Chip Resistor, Body 2.0x1.3mm, IPC Low Density (Make www.tarahiboard.com))
footprint RESC2012N (0805) (Chip Resistor, Body 2.0x1.3mm, IPC Medium Density (Make www.tarahiboard.com))
footprint RES 0805 (2012X06L) (Chip Resistor, 2-Leads, Body 2.0x1.3mm, IPC High Density _ (0.100 W) (Make www.tarahiboard.com))
footprint R0805 (CHIP RESISTOR 1/8 WATT ,2.0X1.3mm, 0805, 2012 (Make www.tarahiboard.com))
footprint R0805E (CHIP RESISTOR 1/8 WATT ,2.0X1.3mm, 0805, EXPANDED PAD (Make www.tarahiboard.com))
pins: 1, 2

## Resistor SMD 0805_16
designator R?, comment value 650  (hidden comment: Resistor SMD 0805)
DatasheetVersion: 2022; ComponentLink1Description: Website: Tarahiboard; ComponentLink1URL: https://www.tarahiboard.com/product/library-pack
footprint SMD-0805-RES ((Make www.tarahiboard.com))
footprint RESC2012L (0805) (Chip Resistor, Body 2.0x1.3mm, IPC High Density (Make www.tarahiboard.com))
footprint RESC2012M (0805) (Chip Resistor, Body 2.0x1.3mm, IPC Low Density (Make www.tarahiboard.com))
footprint RESC2012N (0805) (Chip Resistor, Body 2.0x1.3mm, IPC Medium Density (Make www.tarahiboard.com))
footprint RES 0805 (2012X06L) (Chip Resistor, 2-Leads, Body 2.0x1.3mm, IPC High Density _ (0.100 W) (Make www.tarahiboard.com))
footprint R0805 (CHIP RESISTOR 1/8 WATT ,2.0X1.3mm, 0805, 2012 (Make www.tarahiboard.com))
footprint R0805E (CHIP RESISTOR 1/8 WATT ,2.0X1.3mm, 0805, EXPANDED PAD (Make www.tarahiboard.com))
pins: 1, 2

## Resistor SMD 0805_17
designator R?, comment value 27K  (hidden comment: Resistor SMD 0805)
DatasheetVersion: 2022; ComponentLink1Description: Website: Tarahiboard; ComponentLink1URL: https://www.tarahiboard.com/product/library-pack
footprint SMD-0805-RES ((Make www.tarahiboard.com))
footprint RESC2012L (0805) (Chip Resistor, Body 2.0x1.3mm, IPC High Density (Make www.tarahiboard.com))
footprint RESC2012M (0805) (Chip Resistor, Body 2.0x1.3mm, IPC Low Density (Make www.tarahiboard.com))
footprint RESC2012N (0805) (Chip Resistor, Body 2.0x1.3mm, IPC Medium Density (Make www.tarahiboard.com))
footprint RES 0805 (2012X06L) (Chip Resistor, 2-Leads, Body 2.0x1.3mm, IPC High Density _ (0.100 W) (Make www.tarahiboard.com))
footprint R0805 (CHIP RESISTOR 1/8 WATT ,2.0X1.3mm, 0805, 2012 (Make www.tarahiboard.com))
footprint R0805E (CHIP RESISTOR 1/8 WATT ,2.0X1.3mm, 0805, EXPANDED PAD (Make www.tarahiboard.com))
pins: 1, 2

## Resistor SMD 0805_18
designator R?, comment value 220  (hidden comment: Resistor SMD 0805)
DatasheetVersion: 2022; ComponentLink1Description: Website: Tarahiboard; ComponentLink1URL: https://www.tarahiboard.com/product/library-pack
footprint SMD-0805-RES ((Make www.tarahiboard.com))
footprint RESC2012L (0805) (Chip Resistor, Body 2.0x1.3mm, IPC High Density (Make www.tarahiboard.com))
footprint RESC2012M (0805) (Chip Resistor, Body 2.0x1.3mm, IPC Low Density (Make www.tarahiboard.com))
footprint RESC2012N (0805) (Chip Resistor, Body 2.0x1.3mm, IPC Medium Density (Make www.tarahiboard.com))
footprint RES 0805 (2012X06L) (Chip Resistor, 2-Leads, Body 2.0x1.3mm, IPC High Density _ (0.100 W) (Make www.tarahiboard.com))
footprint R0805 (CHIP RESISTOR 1/8 WATT ,2.0X1.3mm, 0805, 2012 (Make www.tarahiboard.com))
footprint R0805E (CHIP RESISTOR 1/8 WATT ,2.0X1.3mm, 0805, EXPANDED PAD (Make www.tarahiboard.com))
pins: 1, 2

## Resistor SMD 0805_19
designator R?, comment value 4.87K  (hidden comment: Resistor SMD 0805)
DatasheetVersion: 2022; ComponentLink1Description: Website: Tarahiboard; ComponentLink1URL: https://www.tarahiboard.com/product/library-pack
footprint SMD-0805-RES ((Make www.tarahiboard.com))
footprint RESC2012L (0805) (Chip Resistor, Body 2.0x1.3mm, IPC High Density (Make www.tarahiboard.com))
footprint RESC2012M (0805) (Chip Resistor, Body 2.0x1.3mm, IPC Low Density (Make www.tarahiboard.com))
footprint RESC2012N (0805) (Chip Resistor, Body 2.0x1.3mm, IPC Medium Density (Make www.tarahiboard.com))
footprint RES 0805 (2012X06L) (Chip Resistor, 2-Leads, Body 2.0x1.3mm, IPC High Density _ (0.100 W) (Make www.tarahiboard.com))
footprint R0805 (CHIP RESISTOR 1/8 WATT ,2.0X1.3mm, 0805, 2012 (Make www.tarahiboard.com))
footprint R0805E (CHIP RESISTOR 1/8 WATT ,2.0X1.3mm, 0805, EXPANDED PAD (Make www.tarahiboard.com))
pins: 1, 2

## Resistor SMD 0805_20
designator R?, comment value 60  (hidden comment: Resistor SMD 0805)
DatasheetVersion: 2022; ComponentLink1Description: Website: Tarahiboard; ComponentLink1URL: https://www.tarahiboard.com/product/library-pack
footprint SMD-0805-RES ((Make www.tarahiboard.com))
footprint RESC2012L (0805) (Chip Resistor, Body 2.0x1.3mm, IPC High Density (Make www.tarahiboard.com))
footprint RESC2012M (0805) (Chip Resistor, Body 2.0x1.3mm, IPC Low Density (Make www.tarahiboard.com))
footprint RESC2012N (0805) (Chip Resistor, Body 2.0x1.3mm, IPC Medium Density (Make www.tarahiboard.com))
footprint RES 0805 (2012X06L) (Chip Resistor, 2-Leads, Body 2.0x1.3mm, IPC High Density _ (0.100 W) (Make www.tarahiboard.com))
footprint R0805 (CHIP RESISTOR 1/8 WATT ,2.0X1.3mm, 0805, 2012 (Make www.tarahiboard.com))
footprint R0805E (CHIP RESISTOR 1/8 WATT ,2.0X1.3mm, 0805, EXPANDED PAD (Make www.tarahiboard.com))
pins: 1, 2

## Resistor SMD 0805_21
designator R?, comment value 0  (hidden comment: Resistor SMD 0805)
DatasheetVersion: 2022; ComponentLink1Description: Website: Tarahiboard; ComponentLink1URL: https://www.tarahiboard.com/product/library-pack
footprint SMD-0805-RES ((Make www.tarahiboard.com))
footprint RESC2012L (0805) (Chip Resistor, Body 2.0x1.3mm, IPC High Density (Make www.tarahiboard.com))
footprint RESC2012M (0805) (Chip Resistor, Body 2.0x1.3mm, IPC Low Density (Make www.tarahiboard.com))
footprint RESC2012N (0805) (Chip Resistor, Body 2.0x1.3mm, IPC Medium Density (Make www.tarahiboard.com))
footprint RES 0805 (2012X06L) (Chip Resistor, 2-Leads, Body 2.0x1.3mm, IPC High Density _ (0.100 W) (Make www.tarahiboard.com))
footprint R0805 (CHIP RESISTOR 1/8 WATT ,2.0X1.3mm, 0805, 2012 (Make www.tarahiboard.com))
footprint R0805E (CHIP RESISTOR 1/8 WATT ,2.0X1.3mm, 0805, EXPANDED PAD (Make www.tarahiboard.com))
pins: 1, 2

## Resistor SMD 0805_22
designator R?, comment value 470  (hidden comment: Resistor SMD 0805)
DatasheetVersion: 2022; ComponentLink1Description: Website: Tarahiboard; ComponentLink1URL: https://www.tarahiboard.com/product/library-pack
footprint SMD-0805-RES ((Make www.tarahiboard.com))
footprint RESC2012L (0805) (Chip Resistor, Body 2.0x1.3mm, IPC High Density (Make www.tarahiboard.com))
footprint RESC2012M (0805) (Chip Resistor, Body 2.0x1.3mm, IPC Low Density (Make www.tarahiboard.com))
footprint RESC2012N (0805) (Chip Resistor, Body 2.0x1.3mm, IPC Medium Density (Make www.tarahiboard.com))
footprint RES 0805 (2012X06L) (Chip Resistor, 2-Leads, Body 2.0x1.3mm, IPC High Density _ (0.100 W) (Make www.tarahiboard.com))
footprint R0805 (CHIP RESISTOR 1/8 WATT ,2.0X1.3mm, 0805, 2012 (Make www.tarahiboard.com))
footprint R0805E (CHIP RESISTOR 1/8 WATT ,2.0X1.3mm, 0805, EXPANDED PAD (Make www.tarahiboard.com))
pins: 1, 2

## Resistor SMD 0805_23
designator R?, comment value 33  (hidden comment: Resistor SMD 0805)
DatasheetVersion: 2022; ComponentLink1Description: Website: Tarahiboard; ComponentLink1URL: https://www.tarahiboard.com/product/library-pack
footprint SMD-0805-RES ((Make www.tarahiboard.com))
footprint RESC2012L (0805) (Chip Resistor, Body 2.0x1.3mm, IPC High Density (Make www.tarahiboard.com))
footprint RESC2012M (0805) (Chip Resistor, Body 2.0x1.3mm, IPC Low Density (Make www.tarahiboard.com))
footprint RESC2012N (0805) (Chip Resistor, Body 2.0x1.3mm, IPC Medium Density (Make www.tarahiboard.com))
footprint RES 0805 (2012X06L) (Chip Resistor, 2-Leads, Body 2.0x1.3mm, IPC High Density _ (0.100 W) (Make www.tarahiboard.com))
footprint R0805 (CHIP RESISTOR 1/8 WATT ,2.0X1.3mm, 0805, 2012 (Make www.tarahiboard.com))
footprint R0805E (CHIP RESISTOR 1/8 WATT ,2.0X1.3mm, 0805, EXPANDED PAD (Make www.tarahiboard.com))
pins: 1, 2

## Resistor SMD 0805_24
designator R?, comment value 1.8K  (hidden comment: Resistor SMD 0805)
DatasheetVersion: 2022; ComponentLink1Description: Website: Tarahiboard; ComponentLink1URL: https://www.tarahiboard.com/product/library-pack
footprint SMD-0805-RES ((Make www.tarahiboard.com))
footprint RESC2012L (0805) (Chip Resistor, Body 2.0x1.3mm, IPC High Density (Make www.tarahiboard.com))
footprint RESC2012M (0805) (Chip Resistor, Body 2.0x1.3mm, IPC Low Density (Make www.tarahiboard.com))
footprint RESC2012N (0805) (Chip Resistor, Body 2.0x1.3mm, IPC Medium Density (Make www.tarahiboard.com))
footprint RES 0805 (2012X06L) (Chip Resistor, 2-Leads, Body 2.0x1.3mm, IPC High Density _ (0.100 W) (Make www.tarahiboard.com))
footprint R0805 (CHIP RESISTOR 1/8 WATT ,2.0X1.3mm, 0805, 2012 (Make www.tarahiboard.com))
footprint R0805E (CHIP RESISTOR 1/8 WATT ,2.0X1.3mm, 0805, EXPANDED PAD (Make www.tarahiboard.com))
pins: 1, 2

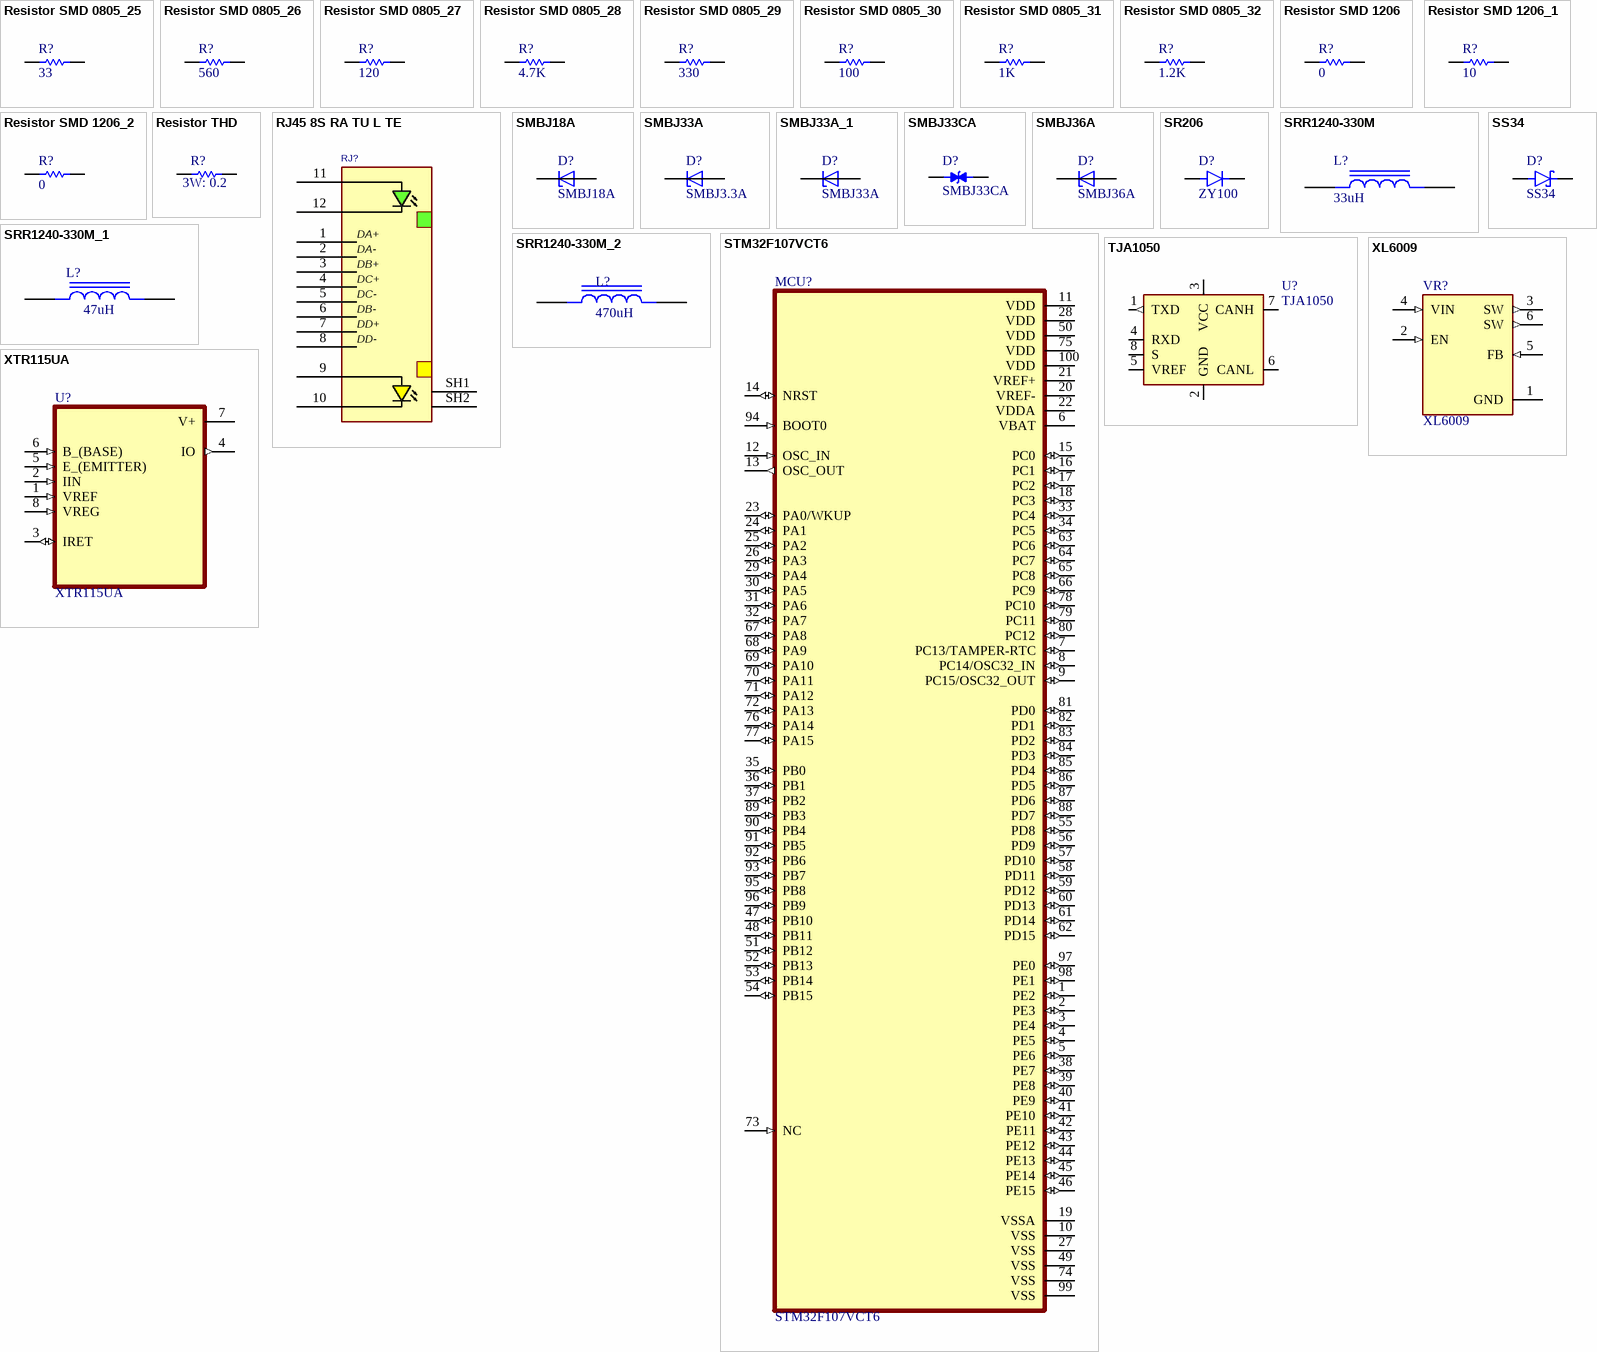
[diagram p2: symbols Resistor SMD 0805_25 to XTR115UA]

## Resistor SMD 0805_25
designator R?, comment value 33  (hidden comment: Resistor SMD 0805)
DatasheetVersion: 2022; ComponentLink1Description: Website: Tarahiboard; ComponentLink1URL: https://www.tarahiboard.com/product/library-pack
footprint SMD-0805-RES ((Make www.tarahiboard.com))
footprint RESC2012L (0805) (Chip Resistor, Body 2.0x1.3mm, IPC High Density (Make www.tarahiboard.com))
footprint RESC2012M (0805) (Chip Resistor, Body 2.0x1.3mm, IPC Low Density (Make www.tarahiboard.com))
footprint RESC2012N (0805) (Chip Resistor, Body 2.0x1.3mm, IPC Medium Density (Make www.tarahiboard.com))
footprint RES 0805 (2012X06L) (Chip Resistor, 2-Leads, Body 2.0x1.3mm, IPC High Density _ (0.100 W) (Make www.tarahiboard.com))
footprint R0805 (CHIP RESISTOR 1/8 WATT ,2.0X1.3mm, 0805, 2012 (Make www.tarahiboard.com))
footprint R0805E (CHIP RESISTOR 1/8 WATT ,2.0X1.3mm, 0805, EXPANDED PAD (Make www.tarahiboard.com))
pins: 1, 2

## Resistor SMD 0805_26
designator R?, comment value 560  (hidden comment: Resistor SMD 0805)
DatasheetVersion: 2022; ComponentLink1Description: Website: Tarahiboard; ComponentLink1URL: https://www.tarahiboard.com/product/library-pack
footprint SMD-0805-RES ((Make www.tarahiboard.com))
footprint RESC2012L (0805) (Chip Resistor, Body 2.0x1.3mm, IPC High Density (Make www.tarahiboard.com))
footprint RESC2012M (0805) (Chip Resistor, Body 2.0x1.3mm, IPC Low Density (Make www.tarahiboard.com))
footprint RESC2012N (0805) (Chip Resistor, Body 2.0x1.3mm, IPC Medium Density (Make www.tarahiboard.com))
footprint RES 0805 (2012X06L) (Chip Resistor, 2-Leads, Body 2.0x1.3mm, IPC High Density _ (0.100 W) (Make www.tarahiboard.com))
footprint R0805 (CHIP RESISTOR 1/8 WATT ,2.0X1.3mm, 0805, 2012 (Make www.tarahiboard.com))
footprint R0805E (CHIP RESISTOR 1/8 WATT ,2.0X1.3mm, 0805, EXPANDED PAD (Make www.tarahiboard.com))
pins: 1, 2

## Resistor SMD 0805_27
designator R?, comment value 120  (hidden comment: Resistor SMD 0805)
DatasheetVersion: 2022; ComponentLink1Description: Website: Tarahiboard; ComponentLink1URL: https://www.tarahiboard.com/product/library-pack
footprint SMD-0805-RES ((Make www.tarahiboard.com))
footprint RESC2012L (0805) (Chip Resistor, Body 2.0x1.3mm, IPC High Density (Make www.tarahiboard.com))
footprint RESC2012M (0805) (Chip Resistor, Body 2.0x1.3mm, IPC Low Density (Make www.tarahiboard.com))
footprint RESC2012N (0805) (Chip Resistor, Body 2.0x1.3mm, IPC Medium Density (Make www.tarahiboard.com))
footprint RES 0805 (2012X06L) (Chip Resistor, 2-Leads, Body 2.0x1.3mm, IPC High Density _ (0.100 W) (Make www.tarahiboard.com))
footprint R0805 (CHIP RESISTOR 1/8 WATT ,2.0X1.3mm, 0805, 2012 (Make www.tarahiboard.com))
footprint R0805E (CHIP RESISTOR 1/8 WATT ,2.0X1.3mm, 0805, EXPANDED PAD (Make www.tarahiboard.com))
pins: 1, 2

## Resistor SMD 0805_28
designator R?, comment value 4.7K  (hidden comment: Resistor SMD 0805)
DatasheetVersion: 2022; ComponentLink1Description: Website: Tarahiboard; ComponentLink1URL: https://www.tarahiboard.com/product/library-pack
footprint SMD-0805-RES ((Make www.tarahiboard.com))
footprint RESC2012L (0805) (Chip Resistor, Body 2.0x1.3mm, IPC High Density (Make www.tarahiboard.com))
footprint RESC2012M (0805) (Chip Resistor, Body 2.0x1.3mm, IPC Low Density (Make www.tarahiboard.com))
footprint RESC2012N (0805) (Chip Resistor, Body 2.0x1.3mm, IPC Medium Density (Make www.tarahiboard.com))
footprint RES 0805 (2012X06L) (Chip Resistor, 2-Leads, Body 2.0x1.3mm, IPC High Density _ (0.100 W) (Make www.tarahiboard.com))
footprint R0805 (CHIP RESISTOR 1/8 WATT ,2.0X1.3mm, 0805, 2012 (Make www.tarahiboard.com))
footprint R0805E (CHIP RESISTOR 1/8 WATT ,2.0X1.3mm, 0805, EXPANDED PAD (Make www.tarahiboard.com))
pins: 1, 2

## Resistor SMD 0805_29
designator R?, comment value 330  (hidden comment: Resistor SMD 0805)
DatasheetVersion: 2022; ComponentLink1Description: Website: Tarahiboard; ComponentLink1URL: https://www.tarahiboard.com/product/library-pack
footprint SMD-0805-RES ((Make www.tarahiboard.com))
footprint RESC2012L (0805) (Chip Resistor, Body 2.0x1.3mm, IPC High Density (Make www.tarahiboard.com))
footprint RESC2012M (0805) (Chip Resistor, Body 2.0x1.3mm, IPC Low Density (Make www.tarahiboard.com))
footprint RESC2012N (0805) (Chip Resistor, Body 2.0x1.3mm, IPC Medium Density (Make www.tarahiboard.com))
footprint RES 0805 (2012X06L) (Chip Resistor, 2-Leads, Body 2.0x1.3mm, IPC High Density _ (0.100 W) (Make www.tarahiboard.com))
footprint R0805 (CHIP RESISTOR 1/8 WATT ,2.0X1.3mm, 0805, 2012 (Make www.tarahiboard.com))
footprint R0805E (CHIP RESISTOR 1/8 WATT ,2.0X1.3mm, 0805, EXPANDED PAD (Make www.tarahiboard.com))
pins: 1, 2

## Resistor SMD 0805_30
designator R?, comment value 100  (hidden comment: Resistor SMD 0805)
DatasheetVersion: 2022; ComponentLink1Description: Website: Tarahiboard; ComponentLink1URL: https://www.tarahiboard.com/product/library-pack
footprint SMD-0805-RES ((Make www.tarahiboard.com))
footprint RESC2012L (0805) (Chip Resistor, Body 2.0x1.3mm, IPC High Density (Make www.tarahiboard.com))
footprint RESC2012M (0805) (Chip Resistor, Body 2.0x1.3mm, IPC Low Density (Make www.tarahiboard.com))
footprint RESC2012N (0805) (Chip Resistor, Body 2.0x1.3mm, IPC Medium Density (Make www.tarahiboard.com))
footprint RES 0805 (2012X06L) (Chip Resistor, 2-Leads, Body 2.0x1.3mm, IPC High Density _ (0.100 W) (Make www.tarahiboard.com))
footprint R0805 (CHIP RESISTOR 1/8 WATT ,2.0X1.3mm, 0805, 2012 (Make www.tarahiboard.com))
footprint R0805E (CHIP RESISTOR 1/8 WATT ,2.0X1.3mm, 0805, EXPANDED PAD (Make www.tarahiboard.com))
pins: 1, 2

## Resistor SMD 0805_31
designator R?, comment value 1K  (hidden comment: Resistor SMD 0805)
DatasheetVersion: 2022; ComponentLink1Description: Website: Tarahiboard; ComponentLink1URL: https://www.tarahiboard.com/product/library-pack
footprint SMD-0805-RES ((Make www.tarahiboard.com))
footprint RESC2012L (0805) (Chip Resistor, Body 2.0x1.3mm, IPC High Density (Make www.tarahiboard.com))
footprint RESC2012M (0805) (Chip Resistor, Body 2.0x1.3mm, IPC Low Density (Make www.tarahiboard.com))
footprint RESC2012N (0805) (Chip Resistor, Body 2.0x1.3mm, IPC Medium Density (Make www.tarahiboard.com))
footprint RES 0805 (2012X06L) (Chip Resistor, 2-Leads, Body 2.0x1.3mm, IPC High Density _ (0.100 W) (Make www.tarahiboard.com))
footprint R0805 (CHIP RESISTOR 1/8 WATT ,2.0X1.3mm, 0805, 2012 (Make www.tarahiboard.com))
footprint R0805E (CHIP RESISTOR 1/8 WATT ,2.0X1.3mm, 0805, EXPANDED PAD (Make www.tarahiboard.com))
pins: 1, 2

## Resistor SMD 0805_32
designator R?, comment value 1.2K  (hidden comment: Resistor SMD 0805)
DatasheetVersion: 2022; ComponentLink1Description: Website: Tarahiboard; ComponentLink1URL: https://www.tarahiboard.com/product/library-pack
footprint SMD-0805-RES ((Make www.tarahiboard.com))
footprint RESC2012L (0805) (Chip Resistor, Body 2.0x1.3mm, IPC High Density (Make www.tarahiboard.com))
footprint RESC2012M (0805) (Chip Resistor, Body 2.0x1.3mm, IPC Low Density (Make www.tarahiboard.com))
footprint RESC2012N (0805) (Chip Resistor, Body 2.0x1.3mm, IPC Medium Density (Make www.tarahiboard.com))
footprint RES 0805 (2012X06L) (Chip Resistor, 2-Leads, Body 2.0x1.3mm, IPC High Density _ (0.100 W) (Make www.tarahiboard.com))
footprint R0805 (CHIP RESISTOR 1/8 WATT ,2.0X1.3mm, 0805, 2012 (Make www.tarahiboard.com))
footprint R0805E (CHIP RESISTOR 1/8 WATT ,2.0X1.3mm, 0805, EXPANDED PAD (Make www.tarahiboard.com))
pins: 1, 2

## Resistor SMD 1206
designator R?  value 0  (hidden comment: Resistor SMD 1206)
DatasheetVersion: 2022; ComponentLink1Description: Website: Tarahiboard; ComponentLink1URL: https://www.tarahiboard.com/product/library-pack
footprint SMD-1206-RES ((Make www.tarahiboard.com))
footprint RESC3216X60L (1206) (Chip Resistor, Body 3.2x1.6x0.60 mm, IPC High Density (Make www.tarahiboard.com))
footprint RESC3216X60M (1206) (Chip Resistor, Body 3.2x1.6x0.60mm, IPC Low Density (Make www.tarahiboard.com))
footprint RESC3216X60N (1206) (Chip Resistor, Body 3.2x1.6x0.60 mm, IPC Medium Density (Make www.tarahiboard.com))
footprint RESC3216X84L (1206) (Chip Resistor, Body 3.2x1.6x0.84 mm, IPC High Density (Make www.tarahiboard.com))
footprint RESC3216X84M (1206) (Chip Resistor, Body 3.2x1.6x0.84mm, IPC Low Density (Make www.tarahiboard.com))
footprint RESC3216X84N (1206) (Chip Resistor, Body 3.2x1.6x0.84 mm, IPC Medium Density (Make www.tarahiboard.com))
footprint RES 1206 (3216X08L) (Chip Resistor, 2-Leads, Body 3.2x1.6mm, IPC High Density _ (0.125 W) (Make www.tarahiboard.com))
footprint R1206 (CHIP RESISTOR 1/4 WATT, Body 3.2x1.6mm,1206, 3216 (Make www.tarahiboard.com))
footprint R1206E (CHIP RESISTOR 1/4 WATT, EXPANDED PAD (Make www.tarahiboard.com))
pins: 1, 2

## Resistor SMD 1206_1
designator R?, comment value 10  (hidden comment: Resistor SMD 1206)
DatasheetVersion: 2022; ComponentLink1Description: Website: Tarahiboard; ComponentLink1URL: https://www.tarahiboard.com/product/library-pack
footprint SMD-1206-RES ((Make www.tarahiboard.com))
footprint RESC3216X60L (1206) (Chip Resistor, Body 3.2x1.6x0.60 mm, IPC High Density (Make www.tarahiboard.com))
footprint RESC3216X60M (1206) (Chip Resistor, Body 3.2x1.6x0.60mm, IPC Low Density (Make www.tarahiboard.com))
footprint RESC3216X60N (1206) (Chip Resistor, Body 3.2x1.6x0.60 mm, IPC Medium Density (Make www.tarahiboard.com))
footprint RESC3216X84L (1206) (Chip Resistor, Body 3.2x1.6x0.84 mm, IPC High Density (Make www.tarahiboard.com))
footprint RESC3216X84M (1206) (Chip Resistor, Body 3.2x1.6x0.84mm, IPC Low Density (Make www.tarahiboard.com))
footprint RESC3216X84N (1206) (Chip Resistor, Body 3.2x1.6x0.84 mm, IPC Medium Density (Make www.tarahiboard.com))
footprint RES 1206 (3216X08L) (Chip Resistor, 2-Leads, Body 3.2x1.6mm, IPC High Density _ (0.125 W) (Make www.tarahiboard.com))
footprint R1206 (CHIP RESISTOR 1/4 WATT, Body 3.2x1.6mm,1206, 3216 (Make www.tarahiboard.com))
footprint R1206E (CHIP RESISTOR 1/4 WATT, EXPANDED PAD (Make www.tarahiboard.com))
pins: 1, 2

## Resistor SMD 1206_2
designator R?, comment value 0  (hidden comment: Resistor SMD 1206)
DatasheetVersion: 2022; ComponentLink1Description: Website: Tarahiboard; ComponentLink1URL: https://www.tarahiboard.com/product/library-pack
footprint SMD-1206-RES ((Make www.tarahiboard.com))
footprint RESC3216X60L (1206) (Chip Resistor, Body 3.2x1.6x0.60 mm, IPC High Density (Make www.tarahiboard.com))
footprint RESC3216X60M (1206) (Chip Resistor, Body 3.2x1.6x0.60mm, IPC Low Density (Make www.tarahiboard.com))
footprint RESC3216X60N (1206) (Chip Resistor, Body 3.2x1.6x0.60 mm, IPC Medium Density (Make www.tarahiboard.com))
footprint RESC3216X84L (1206) (Chip Resistor, Body 3.2x1.6x0.84 mm, IPC High Density (Make www.tarahiboard.com))
footprint RESC3216X84M (1206) (Chip Resistor, Body 3.2x1.6x0.84mm, IPC Low Density (Make www.tarahiboard.com))
footprint RESC3216X84N (1206) (Chip Resistor, Body 3.2x1.6x0.84 mm, IPC Medium Density (Make www.tarahiboard.com))
footprint RES 1206 (3216X08L) (Chip Resistor, 2-Leads, Body 3.2x1.6mm, IPC High Density _ (0.125 W) (Make www.tarahiboard.com))
footprint R1206 (CHIP RESISTOR 1/4 WATT, Body 3.2x1.6mm,1206, 3216 (Make www.tarahiboard.com))
footprint R1206E (CHIP RESISTOR 1/4 WATT, EXPANDED PAD (Make www.tarahiboard.com))
pins: 1, 2

## Resistor THD
designator R?  3W: 0.2  (hidden comment: Resistor THD)
DatasheetVersion: 2022; ComponentLink1Description: Website: Tarahiboard; ComponentLink1URL: https://www.tarahiboard.com/product/library-pack
footprint RWW10W_VER (RESISTOR 10 WATT, Wirewound (Make www.tarahiboard.com))
footprint RWW5W (RESISTOR 5 WATT, Wirewound (Make www.tarahiboard.com))
footprint RWW2W_VER (RESISTOR 2 WATT, Wirewound (Make www.tarahiboard.com))
footprint Res_0.25w ((Make www.tarahiboard.com))
footprint Resistor_3W ((Make www.tarahiboard.com))
footprint Resistor_0.5W ((Make www.tarahiboard.com))
footprint Res-(5/1)-Stand ((Make www.tarahiboard.com))
footprint Res-(1/4)-Stand ((Make www.tarahiboard.com))
footprint Res-(1/2)-Stand ((Make www.tarahiboard.com))
footprint Res-(1/8) ((Make www.tarahiboard.com))
footprint Res-(1/4) ((Make www.tarahiboard.com))
footprint Res-(1/2) ((Make www.tarahiboard.com))
footprint Res-(1/1) ((Make www.tarahiboard.com))
footprint R0125W_AX_VER (RESISTOR 1/8 WATT, AXIAL0.25 (Make www.tarahiboard.com))
footprint R1W_AX06 (RESISTOR 1 WATT, AXIAL0.6 (Make www.tarahiboard.com))
footprint R2W_AX08 (RESISTOR 2 WATT, AXIAL0.8 (Make www.tarahiboard.com))
footprint R2W_AX_VER (RESISTOR 2 WATT, AXIAL0.8 (Make www.tarahiboard.com))
footprint R3W_AX09 (RESISTOR 3 WATT, AXIAL0.9 (Make www.tarahiboard.com))
footprint R4W_AX10 (RESISTOR 4 WATT, AXIAL1.0 (Make www.tarahiboard.com))
footprint R05W_AX05 (RESISTOR 0.5 WATT, AXIAL0.5 (Make www.tarahiboard.com))
footprint R5W_AX11 (RESISTOR 5 WATT, AXIAL1.1 (Make www.tarahiboard.com))
footprint R5W_VER (RESISTOR 5 WATT, AXIAL1.1 (Make www.tarahiboard.com))
footprint R10W_AX11 (RESISTOR 10 WATT, AXIAL1.1 (Make www.tarahiboard.com))
footprint R025W_AX04 (RESISTOR 1/4 WATT, AXIAL0.4 (Make www.tarahiboard.com))
footprint R10W_AX14 (RESISTOR 10 WATT, AXIAL1.4 (Make www.tarahiboard.com))
footprint R10W_AX20 (RESISTOR 10 WATT, AXIAL2.0 (Make www.tarahiboard.com))
footprint R0125W_AX03 (RESISTOR 1/8 WATT, AXIAL0.3 INCH SPACING (Make www.tarahiboard.com))
footprint R0125W_AX025 (RESISTOR 1/8 WATT, AXIAL0.25 (Make www.tarahiboard.com))
pins: 1, 2

## RJ45 8S RA TU L TE
designator RJ?  (value not drawn)
RJ45, 8P+LED, SHIELDED, RightAngle, TabUP; DatasheetVersion: 2022; ComponentLink1Description: Tarahiboard; ComponentLink1URL: https://www.tarahiboard.com/product/library-pack
footprint RJ45_8S_RA_TU_L (RJ45, 8P+LED, SHIELDED, RightAngle, TabUP, WURTH 615008137421   (Make www.tarahiboard.com))
pins: 1 DA+, 2 DA-, 3 DB+, 4 DC+, 5 DC-, 6 DB-, 7 DD+, 8 DD-, 9 YLED+, 10 YLED-, 11 GLED+, 12 GLED-, SH1, SH2